# Altium schematic symbol library 20A_Fuse.SchLib: 1 symbol
Pins are listed as number, name and electrical type; pins without a type are passive.

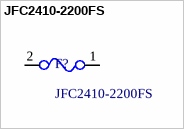
[diagram p0: symbol JFC2410-2200FS]

## JFC2410-2200FS
designator F?
20A Fuse. 72V; LSCS Part #: JDTfuse
footprint F_2410_JDTfuse (20A Fuse 72V)
pins: 1, 2